# Altium footprint library 324921046_FPC.PcbLib: 1 footprints
Each footprint in its own frame and in the unit in brackets; x right, y up, seen from the top. Pads: shape width x height; smd on the part's side, far side on the other; paste and mask are expansions set on the pad; w line width, h text height; cw(c..) or ccw(c..) is an arc to the next point about the centre after c.
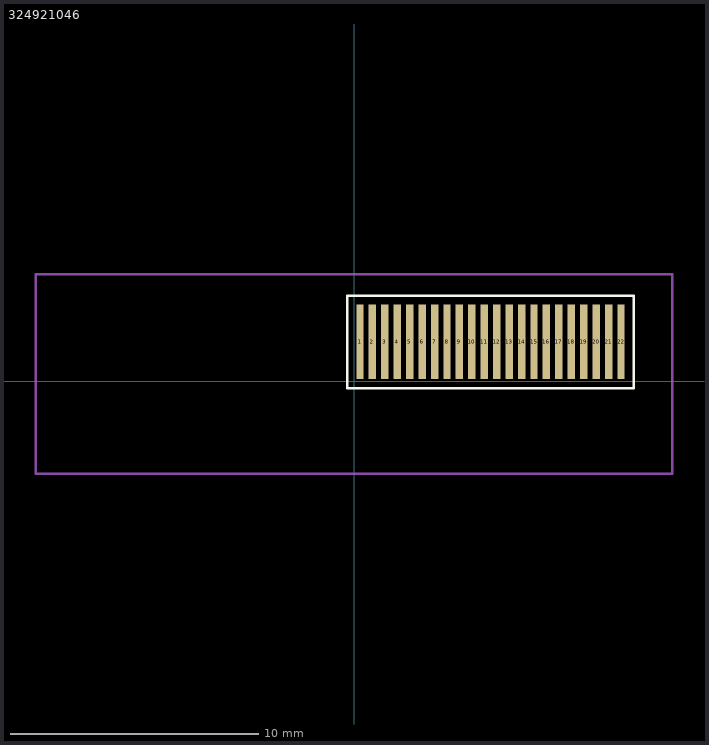
[diagram p0: the footprint, top view; thin cyan lines are the x and y axes]

## 324921046 [mm]
pads (22):
  rect 0.3x3 smd: 1(0.242,1.592) 2(0.742,1.592) 3(1.242,1.592) 4(1.742,1.592) 5(2.242,1.592) 6(2.742,1.592) 7(3.242,1.592) 8(3.742,1.592) 9(4.242,1.592) 10(4.742,1.592) 11(5.242,1.592) 12(5.742,1.592) 13(6.242,1.592) 14(6.742,1.592) 15(7.242,1.592) 16(7.742,1.592) 17(8.242,1.592) 18(8.742,1.592) 19(9.242,1.592) 20(9.742,1.592) 21(10.242,1.592) 22(10.742,1.592)
Top Overlay:
  lines w0.1: -0.279,-0.279 11.252,-0.279 11.252,3.454 -0.279,3.454 -0.279,-0.279 ; 0.242,2.682 cw(c0.242,2.732) 0.242,2.782 cw(c0.242,2.732) 0.242,2.682
Mechanical 20:
  lines w0.1: -12.8,-3.71 -12.8,4.31 12.8,4.31 12.8,-3.71 -12.8,-3.71